# Altium schematic symbol library Header2.SchLib: 50 symbols
Pins are listed as number, name and electrical type; pins without a type are passive.

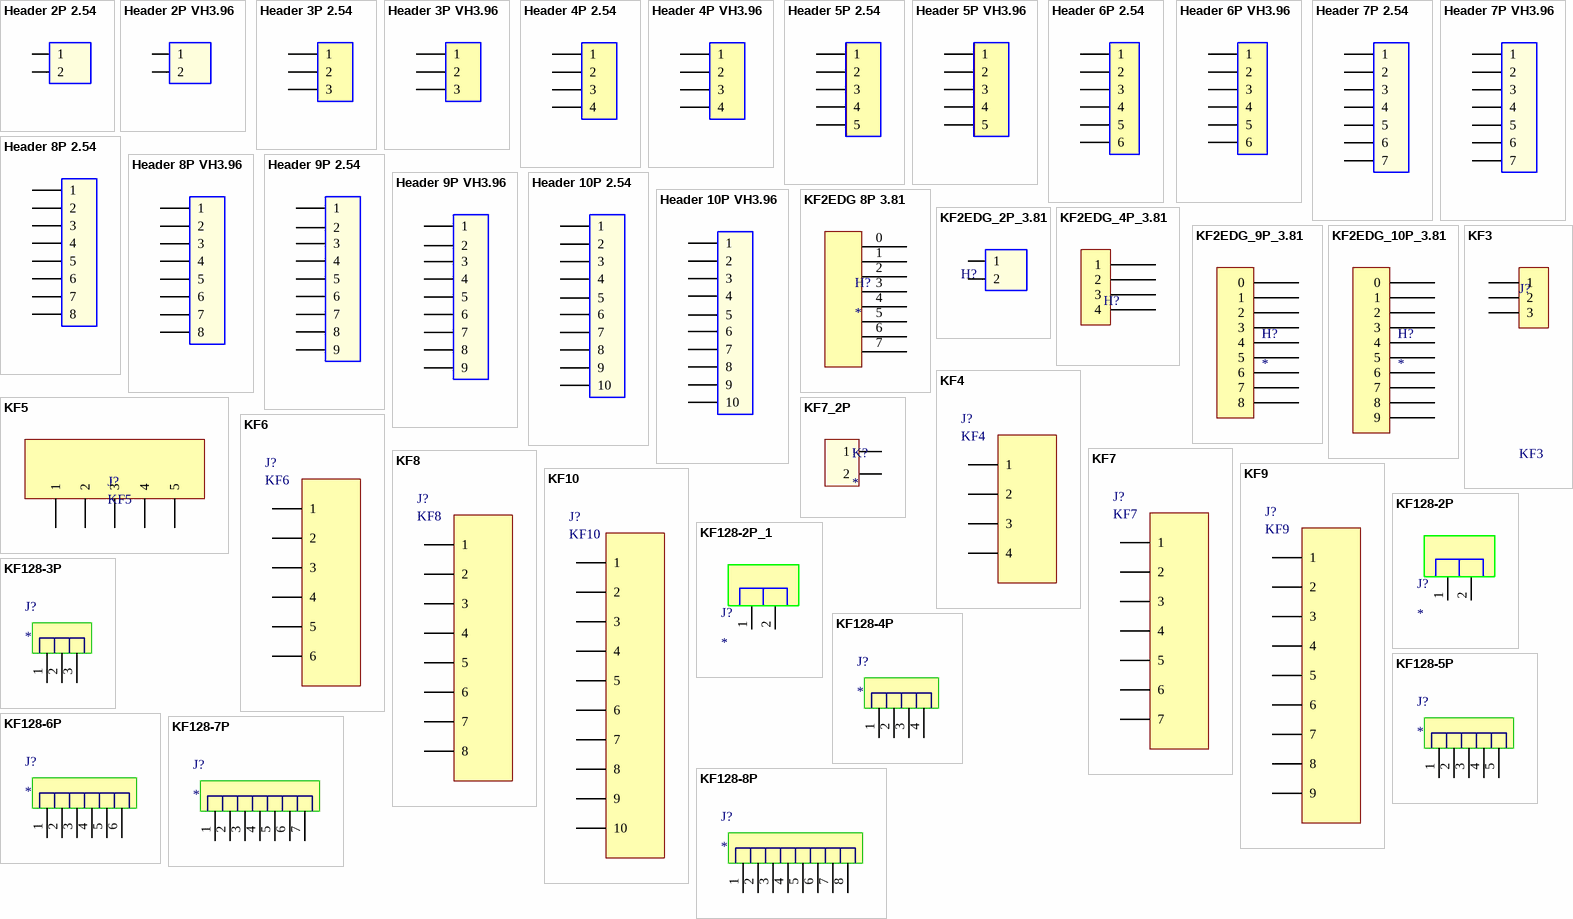
[diagram p0: symbols Header 2P 2.54 to KF128-8P]

## Header 2P 2.54
designator H?
Cắm Đực Thẳng; Ten_Linh_Kien: Header 2P XH2.54-2P Đực Thẳng; Don_Vi: Con; Ma_Hang: MH001283; Chung_Loai: Cắm
footprint XH2.54M-2
footprint Header 2P DC 2.54
pins: 1, 2

## Header 2P VH3.96
designator H?
Cắm Đực Thẳng; Ten_Linh_Kien: Header 2P XH2.54-2P Đực Thẳng; Don_Vi: Con; Ma_Hang: MH001283; Chung_Loai: Cắm
footprint VH3.96M-2
pins: 1, 2

## Header 3P 2.54
designator H?
Cắm Đực Thẳng; Ten_Linh_Kien: Header 3P XH2.54-3P Đực Thẳng; Don_Vi: Con; Ma_Hang: MH001292; Chung_Loai: Cắm
footprint XH2.54M-3
footprint Header 3P DC 2.54
pins: 1, 2, 3

## Header 3P VH3.96
designator H?
Cắm Đực Thẳng; Ten_Linh_Kien: Header 3P XH2.54-3P Đực Thẳng; Don_Vi: Con; Ma_Hang: MH001292; Chung_Loai: Cắm
footprint VH3.96M-3
pins: 1, 2, 3

## Header 4P 2.54
designator H?
Cắm Đực Thẳng; Ten_Linh_Kien: Header 4P XH2.54-4P Đực Thẳng; Don_Vi: Con; Ma_Hang: MH001285; Chung_Loai: Cắm
footprint XH2.54M-4
footprint Header 4P DC 2.54
pins: 1, 2, 3, 4

## Header 4P VH3.96
designator H?
Cắm Đực Thẳng; Ten_Linh_Kien: Header 4P XH2.54-4P Đực Thẳng; Don_Vi: Con; Ma_Hang: MH001285; Chung_Loai: Cắm
footprint VH3.96M-4
pins: 1, 2, 3, 4

## Header 5P 2.54
designator H?
Cắm Đực Thẳng; Ten_Linh_Kien: Header 5P XH2.54-5P Đực Thẳng; Don_Vi: Con; Ma_Hang: MH001298; Chung_Loai: Cắm
footprint XH2.54M-5
footprint Header 5P DC 2.54
pins: 1, 2, 3, 4, 5

## Header 5P VH3.96
designator H?
Cắm Đực Thẳng; Ten_Linh_Kien: Header 5P XH2.54-5P Đực Thẳng; Don_Vi: Con; Ma_Hang: MH001298; Chung_Loai: Cắm
footprint VH3.96M-5
pins: 1, 2, 3, 4, 5

## Header 6P 2.54
designator H?
Cắm Đực Thẳng; Ten_Linh_Kien: Header 6P XH2.54-6P Đực Thẳng; Don_Vi: Con; Ma_Hang: MH001972; Chung_Loai: Cắm
footprint XH2.54M-6
footprint Header 6P DC 2.54
pins: 1, 2, 3, 4, 5, 6

## Header 6P VH3.96
designator H?
Cắm Đực Thẳng; Ten_Linh_Kien: Header 6P XH2.54-6P Đực Thẳng; Don_Vi: Con; Ma_Hang: MH001972; Chung_Loai: Cắm
footprint VH3.96M-6
pins: 1, 2, 3, 4, 5, 6

## Header 7P 2.54
designator H?
Cắm Đực Thẳng; Ten_Linh_Kien: Header 7P XH2.54-7P Đực Thẳng; Don_Vi: Con; Ma_Hang: MH003369; Chung_Loai: Cắm
footprint XH2.54M-7
footprint Header 7P DC 2.54
pins: 1, 2, 3, 4, 5, 6, 7

## Header 7P VH3.96
designator H?
Cắm Đực Thẳng; Ten_Linh_Kien: Header 7P XH2.54-7P Đực Thẳng; Don_Vi: Con; Ma_Hang: MH003369; Chung_Loai: Cắm
footprint VH3.96M-7
pins: 1, 2, 3, 4, 5, 6, 7

## Header 8P 2.54
designator H?
Cắm Đực Thẳng; Ten_Linh_Kien: Header 8P XH2.54-8P Đực Thẳng; Don_Vi: Con; Ma_Hang: MH003366; Chung_Loai: Cắm
footprint XH2.54M-8
footprint Header 8P DC 2.54
pins: 1, 2, 3, 4, 5, 6, 7, 8

## Header 8P VH3.96
designator H?
Cắm Đực Thẳng; Ten_Linh_Kien: Header 8P XH2.54-8P Đực Thẳng; Don_Vi: Con; Ma_Hang: MH003366; Chung_Loai: Cắm
footprint VH3.96M-8
pins: 1, 2, 3, 4, 5, 6, 7, 8

## Header 9P 2.54
designator H?
Cắm Đực Thẳng; Ten_Linh_Kien: Header 8P XH2.54-8P Đực Thẳng; Don_Vi: Con; Ma_Hang: MH003366; Chung_Loai: Cắm
footprint XH2.54M-9
pins: 1, 2, 3, 4, 5, 6, 7, 8, 9

## Header 9P VH3.96
designator H?
Cắm Đực Thẳng; Ten_Linh_Kien: Header 8P XH2.54-8P Đực Thẳng; Don_Vi: Con; Ma_Hang: MH003366; Chung_Loai: Cắm
footprint VH3.96M-9
pins: 1, 2, 3, 4, 5, 6, 7, 8, 9

## Header 10P 2.54
designator H?
Cắm Đực Thẳng; Ten_Linh_Kien: Header 10P XH2.54-10P Đực Thẳng; Don_Vi: Con; Ma_Hang: MH001286; Chung_Loai: Cắm
footprint XH2.54M-10
footprint Header 10P DC 2.54
pins: 1, 2, 3, 4, 5, 6, 7, 8, 9, 10

## Header 10P VH3.96
designator H?
Cắm Đực Thẳng; Ten_Linh_Kien: Header 10P XH2.54-10P Đực Thẳng; Don_Vi: Con; Ma_Hang: MH001286; Chung_Loai: Cắm
footprint VH3.96M-10
pins: 1, 2, 3, 4, 5, 6, 7, 8, 9, 10

## KF2EDG 8P 3.81
designator H?
footprint KF2EDG_8P_3.81MM
pins: 0 21, 1 20, 2 19, 3 18, 4 17, 5 16, 6 15, 7 14

## KF2EDG_2P_3.81
designator H?
MX-3.81-5-R Terminal Block Plug-in
footprint KF2EDG_2P_3.81MM
pins: 1, 2

## KF2EDG_4P_3.81
designator H?
MX-3.81-5-R Terminal Block Plug-in
footprint KF2EDG_4P_3.81MM
pins: 1, 2, 3, 4

## KF2EDG_9P_3.81
designator H?
footprint KF2EDG_9P_3.81MM
pins: 0, 1, 2, 3, 4, 5, 6, 7, 8

## KF2EDG_10P_3.81
designator H?
footprint KF2EDG_10P_3.81mm
pins: 0, 1, 2, 3, 4, 5, 6, 7, 8, 9

## KF3
designator J?
Manufacturer: Würth Elektronik eiSos GmbH; partNo: 691103110003; ComponentLink1 Description: Manufacturer; ComponentLink2 Description: Datasheet; NoPins: 3; Created Date: 29 October 2013; ComponentLink1URL: http://www.we-online.com; ComponentLink2URL: http://katalog.we-online.de/em/datasheet/6911031100xx.pdf; Created by: Karrer Zheng
footprint KF3-5.08
footprint KF3-10 (Serie 1368 - 10.00 mm _ 3 pins)
footprint KF3-3.5 (3,50mm - modular - blue - Horizontal wire entry - Pressure clamp - 8,4mm height - 03p)
footprint KF3-3.96-T1 (3,96mm - modular - blue - Horizontal wire entry - Pressure clamp - 10mm height - 03p)
footprint KF3-8.5
footprint KF3-5.08T (Header 3, 3 pin, hight 300mil, Pin to Pin 200, Colour Green)
footprint KF3-7.62
pins: 1, 2, 3

## KF4
designator J?
Manufacturer: W¨¹rth Elektronik eiSos GmbH; PartNo: 691133710004; ComponentLink1 Description: Manufacturer; ComponentLink2 Description: Datasheet; NoPins: 4; ComponentLink1 URL: http://www.we-online.com; ComponentLink2 URL: http://katalog.we-online.de/em/datasheet/6911337100xx.pdf; Created By: Baojun Chen; Created Date: 4-Aug-15
footprint KF4-5.08
footprint KF4-10 (Serie 1368 - 10.00 mm _ 4 pins)
footprint KF4-5 (Serie 1337 - 5.00 mm_4 pins)
footprint KF4-8.5
footprint KF4-5.08T (Header 4, 4 pin, hight 300mil, Pin to Pin 200, Colour Green)
footprint KF4-7.62
pins: 1, 2, 3, 4

## KF5
designator J?
Manufacturer: W¨¹rth Elektronik eiSos GmbH; PartNo: 691133710005; ComponentLink1 Description: Manufacturer; ComponentLink2 Description: Datasheet; NoPins: 5; ComponentLink1 URL: http://www.we-online.com; ComponentLink2 URL: http://katalog.we-online.de/em/datasheet/6911337100xx.pdf; Created By: Baojun Chen; Created Date: 4-Aug-15
footprint KF5-10 (Serie 1368 - 10.00 mm _ 5 pins)
footprint KF5-5 (Serie 1337 - 5.00 mm_5 pins)
footprint KF5-5.08T
footprint KF5-7.62
pins: 1, 2, 3, 4, 5

## KF6
designator J?
Manufacturer: W¨¹rth Elektronik eiSos GmbH; PartNo: 691133710006; ComponentLink1 Description: Manufacturer; ComponentLink2 Description: Datasheet; NoPins: 6; ComponentLink1 URL: http://www.we-online.com; ComponentLink2 URL: http://katalog.we-online.de/em/datasheet/6911337100xx.pdf; Created By: Baojun Chen; Created Date: 4-Aug-15
footprint KF6-5 (Serie 1337 - 5.00 mm_6 pins)
footprint KF6-10 (Serie 1368 - 10.00 mm _ 6 pins)
pins: 1, 2, 3, 4, 5, 6

## KF7
designator J?
Manufacturer: W¨¹rth Elektronik eiSos GmbH; PartNo: 691133710007; ComponentLink1 Description: Manufacturer; ComponentLink2 Description: Datasheet; NoPins: 7; ComponentLink1 URL: http://www.we-online.com; ComponentLink2 URL: http://katalog.we-online.de/em/datasheet/6911337100xx.pdf; Created By: Baojun Chen; Created Date: 4-Aug-15
footprint KF7-10 (Serie 1368 - 10.00 mm _ 7 pins)
footprint KF7-5 (Serie 1337 - 5.00 mm_7 pins)
pins: 1, 2, 3, 4, 5, 6, 7

## KF7_2P
designator K?
KF7_2P
footprint KF7_2P
footprint KF7_2P - NEW
pins: 1, 2

## KF8
designator J?
Manufacturer: W¨¹rth Elektronik eiSos GmbH; PartNo: 691133710008; ComponentLink1 Description: Manufacturer; ComponentLink2 Description: Datasheet; NoPins: 8; ComponentLink1 URL: http://www.we-online.com; ComponentLink2 URL: http://katalog.we-online.de/em/datasheet/6911337100xx.pdf; Created By: Baojun Chen; Created Date: 4-Aug-15
footprint KF8-10 (Serie 1368 - 10.00 mm _ 8 pins)
footprint KF8-5 (Serie 1337 - 5.00 mm_8 pins)
pins: 1, 2, 3, 4, 5, 6, 7, 8

## KF9
designator J?
Manufacturer: W¨¹rth Elektronik eiSos GmbH; PartNo: 691133710009; ComponentLink1 Description: Manufacturer; ComponentLink2 Description: Datasheet; NoPins: 9; ComponentLink1 URL: http://www.we-online.com; ComponentLink2 URL: http://katalog.we-online.de/em/datasheet/6911337100xx.pdf; Created By: Baojun Chen; Created Date: 4-Aug-15
footprint KF9-10 (Serie 1368 - 10.00 mm _ 9 pins)
footprint KF9-5 (Serie 1337 - 5.00 mm_9 pins)
pins: 1, 2, 3, 4, 5, 6, 7, 8, 9

## KF10
designator J?
Manufacturer: W¨¹rth Elektronik eiSos GmbH; PartNo: 691133710010; ComponentLink1 Description: Manufacturer; ComponentLink2 Description: Datasheet; NoPins: 10; ComponentLink1 URL: http://www.we-online.com; ComponentLink2 URL: http://katalog.we-online.de/em/datasheet/6911337100xx.pdf; Created By: Baojun Chen; Created Date: 4-Aug-15
footprint KF10-10 (Serie 1368 - 10.00 mm _ 10 pins)
footprint KF10-5 (Serie 1337 - 5.00 mm_10 pins)
pins: 1, 2, 3, 4, 5, 6, 7, 8, 9, 10

## KF128-2P
designator J?
footprint KF128-3.81-2P (螺钉式接线端子，脚距3.81mm)
footprint KF128-5.08-2P (螺钉式接线端子，脚距5.08mm)
pins: 1, 2

## KF128-2P_1
designator J?
footprint KF128-3.81-2P (螺钉式接线端子，脚距3.81mm)
footprint KF128-5.08-2P (螺钉式接线端子，脚距5.08mm)
pins: 1, 2

## KF128-3P
designator J?
footprint KF128-3.81-3P (螺钉式接线端子，脚距3.81mm)
footprint KF128-5.08-3P (螺钉式接线端子，脚距5.08mm)
pins: 1, 2, 3

## KF128-4P
designator J?
footprint KF128-3.81-4P (螺钉式接线端子，脚距3.81mm)
footprint KF128-5.08-4P (螺钉式接线端子，脚距5.08mm)
pins: 1, 2, 3, 4

## KF128-5P
designator J?
footprint KF128-3.81-5P (螺钉式接线端子，脚距3.81mm)
footprint KF128-5.08-5P (螺钉式接线端子，脚距5.08mm)
pins: 1, 2, 3, 4, 5

## KF128-6P
designator J?
footprint KF128-3.81-6P (螺钉式接线端子，脚距3.81mm)
footprint KF128-5.08-6P (螺钉式接线端子，脚距5.08mm)
pins: 1, 2, 3, 4, 5, 6

## KF128-7P
designator J?
footprint KF128-3.81-7P (螺钉式接线端子，脚距3.81mm)
footprint KF128-5.08-7P (螺钉式接线端子，脚距5.08mm)
pins: 1, 2, 3, 4, 5, 6, 7

## KF128-8P
designator J?
footprint KF128-3.81-8P (螺钉式接线端子，脚距3.81mm)
footprint KF128-5.08-8P (螺钉式接线端子，脚距5.08mm)
pins: 1, 2, 3, 4, 5, 6, 7, 8

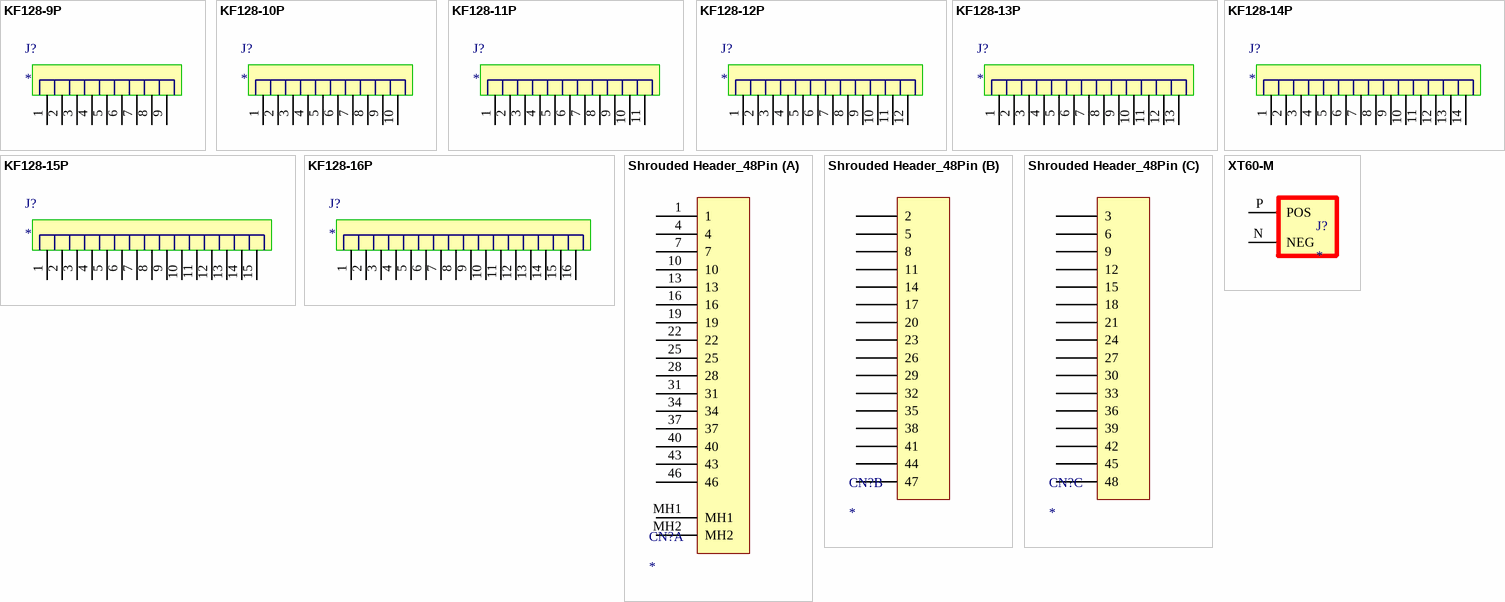
[diagram p1: symbols KF128-9P to XT60-M]

## KF128-9P
designator J?
footprint KF128-5.08-9P (螺钉式接线端子，脚距5.08mm)
footprint KF128-3.81-9P (螺钉式接线端子，脚距3.81mm)
pins: 1, 2, 3, 4, 5, 6, 7, 8, 9

## KF128-10P
designator J?
footprint KF128-5.08-10P (螺钉式接线端子，脚距5.08mm)
footprint KF128-3.81-10P (螺钉式接线端子，脚距3.81mm)
pins: 1, 2, 3, 4, 5, 6, 7, 8, 9, 10

## KF128-11P
designator J?
footprint KF128-3.81-11P (螺钉式接线端子，脚距3.81mm)
footprint KF128-5.08-11P (螺钉式接线端子，脚距5.08mm)
pins: 1, 2, 3, 4, 5, 6, 7, 8, 9, 10, 11

## KF128-12P
designator J?
footprint KF128-3.81-12P (螺钉式接线端子，脚距3.81mm)
footprint KF128-5.08-12P (螺钉式接线端子，脚距5.08mm)
pins: 1, 2, 3, 4, 5, 6, 7, 8, 9, 10, 11, 12

## KF128-13P
designator J?
footprint KF128-3.81-13P (螺钉式接线端子，脚距3.81mm)
footprint KF128-5.08-13P (螺钉式接线端子，脚距5.08mm)
pins: 1, 2, 3, 4, 5, 6, 7, 8, 9, 10, 11, 12, 13

## KF128-14P
designator J?
footprint KF128-5.08-14P (螺钉式接线端子，脚距5.08mm)
footprint KF128-5.08-14P (螺钉式接线端子，脚距5.08mm)
pins: 1, 2, 3, 4, 5, 6, 7, 8, 9, 10, 11, 12, 13, 14

## KF128-15P
designator J?
footprint KF128-3.81-15P (螺钉式接线端子，脚距3.81mm)
footprint KF128-5.08-15P (螺钉式接线端子，脚距5.08mm)
pins: 1, 2, 3, 4, 5, 6, 7, 8, 9, 10, 11, 12, 13, 14, 15

## KF128-16P
designator J?
footprint KF128-3.81-16P (螺钉式接线端子，脚距3.81mm)
footprint KF128-5.08-16P (螺钉式接线端子，脚距5.08mm)
pins: 1, 2, 3, 4, 5, 6, 7, 8, 9, 10, 11, 12, 13, 14, 15, 16

## Shrouded Header_48Pin
designator CN?
footprint Shrouded Header_48Pin
part A pins: 1, 4, 7, 10, 13, 16, 19, 22, 25, 28, 31, 34, 37, 40, 43, 46, MH1, MH2
part B pins: 2, 5, 8, 11, 14, 17, 20, 23, 26, 29, 32, 35, 38, 41, 44, 47
part C pins: 3, 6, 9, 12, 15, 18, 21, 24, 27, 30, 33, 36, 39, 42, 45, 48

## XT60-M
designator J?
Plug; DC supply; XT60; male; PIN: 2; for cable; soldered; 30A; 500V; MF: AMASS; MP: XT60-M; SnapEDA_Link: https://www.snapeda.com/parts/XT60-M/AMASS/view-part/?ref=snap; Package: Package; Value: *; Check_prices: https://www.snapeda.com/parts/XT60-M/AMASS/view-part/?ref=eda
footprint AMASS_XT60-M
pins: N NEG, P POS